# Altium footprint library ECS3201048BCKYTR.PcbLib: 1 footprints
Each footprint in its own frame and in the unit in brackets; x right, y up, seen from the top. Pads: shape width x height; smd on the part's side, far side on the other; paste and mask are expansions set on the pad; w line width, h text height; cw(c..) or ccw(c..) is an arc to the next point about the centre after c.
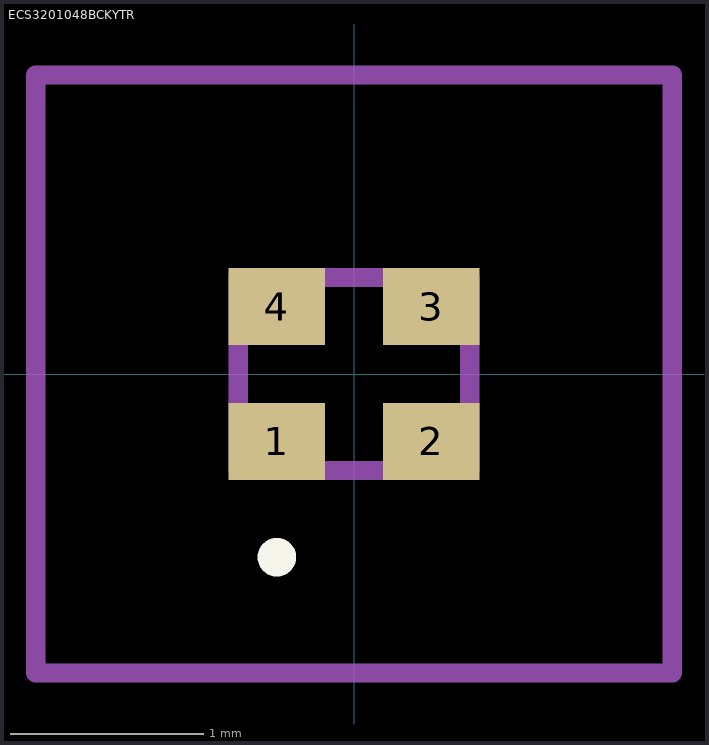
[diagram p0: the footprint, top view; thin cyan lines are the x and y axes]

## ECS3201048BCKYTR [mm]
pads (4):
  rect 0.5x0.4 smd: 1(-0.4,-0.35) 2(0.4,-0.35) 3(0.4,0.35) 4(-0.4,0.35)
Top Overlay:
  lines w0.1: -0.4,-1 -0.4,-1 ; -0.4,-1 ccw(c-0.4,-0.95) -0.4,-0.9 ; -0.4,-1 cw(c-0.4,-0.95) -0.4,-0.9 ; -0.4,-0.9 -0.4,-0.9
Mechanical 15:
  lines w0.1: -0.6,-0.5 0.6,-0.5 0.6,0.5 -0.6,0.5 -0.6,-0.5
Mechanical 20:
  lines w0.1: -1.65,-1.55 1.65,-1.55 1.65,1.55 -1.65,1.55 -1.65,-1.55